# Altium schematic symbol library 烧录.SchLib: 1 symbol
Pins are listed as number, name and electrical type; pins without a type are passive.

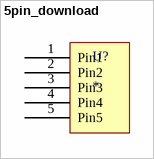
[diagram p0: symbol 5pin_download]

## 5pin_download
designator U?
footprint download_interface_1.27mm
pins: 1 Pin1, 2 Pin2, 3 Pin3, 4 Pin4, 5 Pin5